# Altium schematic symbol library 150060SS75000.SchLib: 1 symbol
Pins are listed as number, name and electrical type; pins without a type are passive.

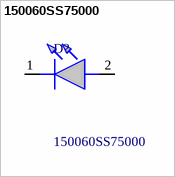
[diagram p0: symbol 150060SS75000]

## 150060SS75000
designator D?
WL-SMCW SMT Mono-Color Chip LED Waterclear 0603, Super Red Typ.(@20mA): 630nm, 60mcd, 1.9V, 140 AlInGaP; Manufacturer_Name: Wurth Elektronik; Geometry.Height: 0.8mm; Mouser Part Number: 710-150060SS75000; Mouser Price/Stock: https://www.mouser.co.uk/ProductDetail/Wurth-Elektronik/150060SS75000?qs=LlUlMxKIyB0oQaxwspeTEA%3D%3D; Manufacturer_Part_Number: 150060SS75000; Datasheet Link: https://www.we-online.com/catalog/datasheet/150060SS75000.pdf
footprint LEDC1608X80N
pins: 1 K, 2 A